# Altium schematic symbol library SMF5.0CA.SchLib: 1 symbol
Pins are listed as number, name and electrical type; pins without a type are passive.

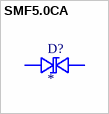
[diagram p0: symbol SMF5.0CA]

## SMF5.0CA
designator D?
9.2V Clamp 21.7A Ipp Tvs Diode Surface Mount SOD-123F; MF: Littelfuse Inc.; MP: SMF5.0CA; SnapEDA_Link: https://www.snapeda.com/parts/SMF5.0CA/Littelfuse/view-part/?ref=snap; Package: SOD-123F Littelfuse; Value: *; Check_prices: https://www.snapeda.com/parts/SMF5.0CA/Littelfuse/view-part/?ref=eda
footprint SOD-123FL
pins: P$1 1 (io), P$2 2 (io)